# EAGLE library part IC_TC7106/7 (library dp_devices.v6)
3-1/2 Digit analog to digital converter http://www.mouser.com/ds/2/268/21455b-3248.pdf
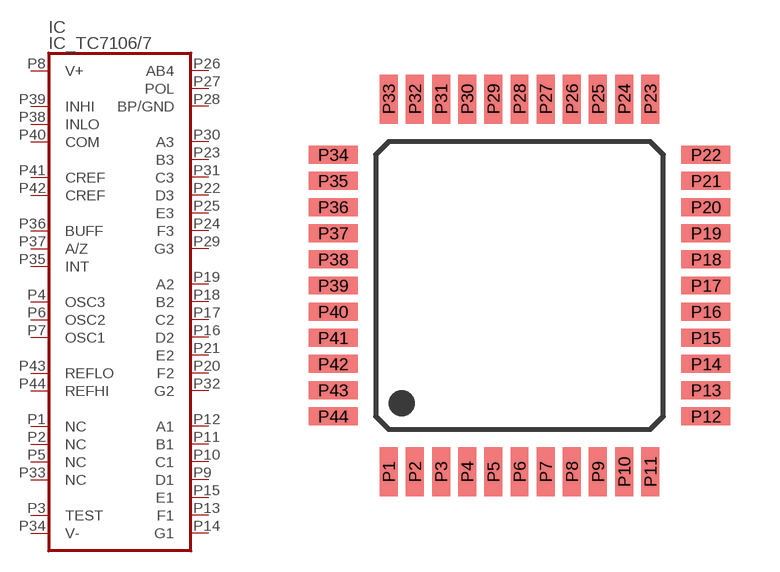
[diagram p162: symbol with the pads of TQFP-44; footprint TQFP-44]

Designator prefix IC

## IC_TC7106/7  [TQFP-44]
P1  NC
P2  NC
P3  TEST
P4  OSC3
P5  NC
P6  OSC2
P7  OSC1
P8  V+  pwr
P9  D1
P10  C1
P11  B1
P12  A1
P13  F1
P14  G1
P15  E1
P16  D2
P17  C2  in
P18  B2  in
P19  A2  in
P20  F2  in
P21  E2  in
P22  D3  in
P23  B3  in
P24  F3  in
P25  E3  in
P26  AB4  in
P27  POL  in
P28  BP/GND  in
P29  G3  in
P30  A3  in
P31  C3  in
P32  G2  in
P33  NC  in
P34  V-  pwr
P35  INT  in
P36  BUFF  in
P37  A/Z  in
P38  INLO  in
P39  INHI  in
P40  COM  in
P41  CREF  in
P42  CREF  in
P43  REFLO  in
P44  REFHI  in

## Footprint TQFP-44 (pad centres in mm)
smd 0.55 x 1.5: P1 -4,-5.7; P2 -3.2,-5.7; P3 -2.4,-5.7; P4 -1.6,-5.7; P5 -0.8,-5.7; P6 0,-5.7; P7 0.8,-5.7; P8 1.6,-5.7; P9 2.4,-5.7; P10 3.2,-5.7; P11 4,-5.7; P23 4,5.7; P24 3.2,5.7; P25 2.4,5.7; P26 1.6,5.7; P27 0.8,5.7; P28 0,5.7; P29 -0.8,5.7; P30 -1.6,5.7; P31 -2.4,5.7; P32 -3.2,5.7; P33 -4,5.7
smd 1.5 x 0.55: P12 5.7,-4; P13 5.7,-3.2; P14 5.7,-2.4; P15 5.7,-1.6; P16 5.7,-0.8; P17 5.7,0; P18 5.7,0.8; P19 5.7,1.6; P20 5.7,2.4; P21 5.7,3.2; P22 5.7,4; P34 -5.7,4; P35 -5.7,3.2; P36 -5.7,2.4; P37 -5.7,1.6; P38 -5.7,0.8; P39 -5.7,0; P40 -5.7,-0.8; P41 -5.7,-1.6; P42 -5.7,-2.4; P43 -5.7,-3.2; P44 -5.7,-4